# Altium footprint library XMSM0L1105TDGS28R.PcbLib: 3 footprints
Each footprint in its own frame and in the unit in brackets; x right, y up, seen from the top. Pads: shape width x height; smd on the part's side, far side on the other; paste and mask are expansions set on the pad; w line width, h text height; cw(c..) or ccw(c..) is an arc to the next point about the centre after c.
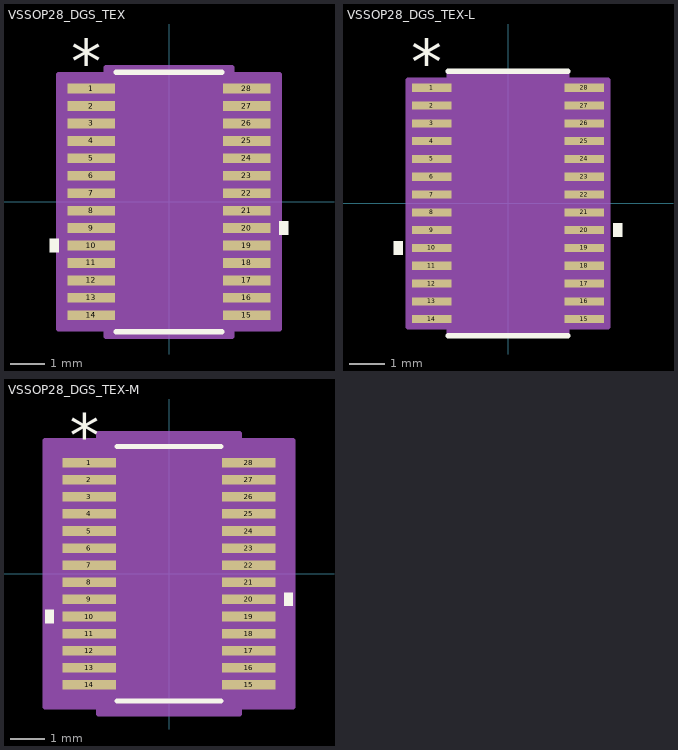
[diagram p0: the footprints below, top view; thin cyan lines are the x and y axes]

## VSSOP28_DGS_TEX [mil]
pads (28):
  rect 53.5x11 smd paste+0 mask+0: 1(-87.75,127.98) 2(-87.75,108.3) 3(-87.75,88.61) 4(-87.75,68.92) 5(-87.75,49.23) 6(-87.75,29.54) 7(-87.75,9.85) 8(-87.75,-9.85) 9(-87.75,-29.54) 10(-87.75,-49.23) 11(-87.75,-68.92) 12(-87.75,-88.61) 13(-87.75,-108.3) 14(-87.75,-127.98) 15(87.75,-127.98) 16(87.75,-108.3) 17(87.75,-88.61) 18(87.75,-68.92) 19(87.75,-49.23) 20(87.75,-29.54) 21(87.75,-9.85) 22(87.75,9.85) 23(87.75,29.54) 24(87.75,49.23) 25(87.75,68.92) 26(87.75,88.61) 27(87.75,108.3) 28(87.75,127.98)
Top Overlay:
  region: -124.5,-41.73 -134.5,-41.73 -134.5,-56.73 -124.5,-56.73
  region: 124.5,-22.04 134.5,-22.04 134.5,-37.03 124.5,-37.03
  lines w6: -59.51,-146.5 59.51,-146.5 ; -59.51,146.5 59.51,146.5
  text "*" at -110.25,133.99 h50
  text ".Designator" at -137.5,-25 h50
Mechanical 13:
  lines w1: -12,141.5 ccw(c0,141.5) 12,141.5 ; -100.5,-133.49 -100.5,-122.48 -61,-122.48 -61,-133.49 -100.5,-133.49 ; -100.5,-113.8 -100.5,-102.8 -61,-102.8 -61,-113.8 -100.5,-113.8 ; -100.5,-94.11 -100.5,-83.11 -61,-83.11 -61,-94.11 -100.5,-94.11 ; -100.5,-74.42 -100.5,-63.41 -61,-63.41 -61,-74.42 -100.5,-74.42 ; -100.5,-54.73 -100.5,-43.73 -61,-43.73 -61,-54.73 -100.5,-54.73 ; -100.5,-35.03 -100.5,-24.04 -61,-24.04 -61,-35.03 -100.5,-35.03 ; -100.5,-15.35 -100.5,-4.34 -61,-4.34 -61,-15.35 -100.5,-15.35 ; -100.5,4.34 -100.5,15.35 -61,15.35 -61,4.34 -100.5,4.34 ; -100.5,24.04 -100.5,35.03 -61,35.03 -61,24.04 -100.5,24.04 ; -100.5,43.73 -100.5,54.73 -61,54.73 -61,43.73 -100.5,43.73 ; -100.5,63.41 -100.5,74.42 -61,74.42 -61,63.41 -100.5,63.41 ; -100.5,83.11 -100.5,94.11 -61,94.11 -61,83.11 -100.5,83.11 ; -100.5,102.8 -100.5,113.8 -61,113.8 -61,102.8 -100.5,102.8 ; -100.5,122.48 -100.5,133.49 -61,133.49 -61,122.48 -100.5,122.48 ; -61,-141.5 61,-141.5 61,141.5 -61,141.5 -61,-141.5 ; 61,-133.49 61,-122.48 100.5,-122.48 100.5,-133.49 61,-133.49 ; 61,-113.8 61,-102.8 100.5,-102.8 100.5,-113.8 61,-113.8 ; 61,-94.11 61,-83.11 100.5,-83.11 100.5,-94.11 61,-94.11 ; 61,-74.42 61,-63.41 100.5,-63.41 100.5,-74.42 61,-74.42 ; 61,-54.73 61,-43.73 100.5,-43.73 100.5,-54.73 61,-54.73 ; 61,-35.03 61,-24.04 100.5,-24.04 100.5,-35.03 61,-35.03 ; 61,-15.35 61,-4.34 100.5,-4.34 100.5,-15.35 61,-15.35 ; 61,4.34 61,15.35 100.5,15.35 100.5,4.34 61,4.34 ; 61,24.04 61,35.03 100.5,35.03 100.5,24.04 61,24.04 ; 61,43.73 61,54.73 100.5,54.73 100.5,43.73 61,43.73 ; 61,63.41 61,74.42 100.5,74.42 100.5,63.41 61,63.41 ; 61,83.11 61,94.11 100.5,94.11 100.5,83.11 61,83.11 ; 61,102.8 61,113.8 100.5,113.8 100.5,102.8 61,102.8 ; 61,122.48 61,133.49 100.5,133.49 100.5,122.48 61,122.48
  text ".Designator" at -137.5,-25 h50
  text "*" at -58.5,88.5 h50
Mechanical 15:
  region: -71,-143.49 -124.5,-143.49 -124.5,143.49 -71,143.49 -71,151.5 71,151.5 71,143.49 124.5,143.49 124.5,-143.49 71,-143.49 71,-151.5 -71,-151.5
  lines w6: -124.5,-143.49 -124.5,143.49 -71,143.49 -71,151.5 71,151.5 71,143.49 124.5,143.49 124.5,-143.49 71,-143.49 71,-151.5 -71,-151.5 -71,-143.49 -124.5,-143.49
3D body "VSSOP28_DGS_TEX.step": height 43.11, standoff 0, extent -100.51,-141.5 100.51,141.5

## VSSOP28_DGS_TEX-L [mil]
pads (28):
  rect 44x9 smd paste+0 mask+0: 1(-84.5,127.98) 2(-84.5,108.3) 3(-84.5,88.61) 4(-84.5,68.92) 5(-84.5,49.23) 6(-84.5,29.54) 7(-84.5,9.85) 8(-84.5,-9.85) 9(-84.5,-29.54) 10(-84.5,-49.23) 11(-84.5,-68.92) 12(-84.5,-88.61) 13(-84.5,-108.3) 14(-84.5,-127.98) 15(84.5,-127.98) 16(84.5,-108.3) 17(84.5,-88.61) 18(84.5,-68.92) 19(84.5,-49.23) 20(84.5,-29.54) 21(84.5,-9.85) 22(84.5,9.85) 23(84.5,29.54) 24(84.5,49.23) 25(84.5,68.92) 26(84.5,88.61) 27(84.5,108.3) 28(84.5,127.98)
Top Overlay:
  region: -116.5,-41.73 -126.5,-41.73 -126.5,-56.73 -116.5,-56.73
  region: 116.5,-22.04 126.5,-22.04 126.5,-37.03 116.5,-37.03
  lines w6: -66,-146.5 66,-146.5 ; -66,146.5 66,146.5
  text "*" at -107,131.99 h50
  text ".Designator" at -137.5,-25 h50
Mechanical 13:
  lines w1: -12,141.5 ccw(c0,141.5) 12,141.5 ; -100.5,-133.49 -100.5,-122.48 -61,-122.48 -61,-133.49 -100.5,-133.49 ; -100.5,-113.8 -100.5,-102.8 -61,-102.8 -61,-113.8 -100.5,-113.8 ; -100.5,-94.11 -100.5,-83.11 -61,-83.11 -61,-94.11 -100.5,-94.11 ; -100.5,-74.42 -100.5,-63.41 -61,-63.41 -61,-74.42 -100.5,-74.42 ; -100.5,-54.73 -100.5,-43.73 -61,-43.73 -61,-54.73 -100.5,-54.73 ; -100.5,-35.03 -100.5,-24.04 -61,-24.04 -61,-35.03 -100.5,-35.03 ; -100.5,-15.35 -100.5,-4.34 -61,-4.34 -61,-15.35 -100.5,-15.35 ; -100.5,4.34 -100.5,15.35 -61,15.35 -61,4.34 -100.5,4.34 ; -100.5,24.04 -100.5,35.03 -61,35.03 -61,24.04 -100.5,24.04 ; -100.5,43.73 -100.5,54.73 -61,54.73 -61,43.73 -100.5,43.73 ; -100.5,63.41 -100.5,74.42 -61,74.42 -61,63.41 -100.5,63.41 ; -100.5,83.11 -100.5,94.11 -61,94.11 -61,83.11 -100.5,83.11 ; -100.5,102.8 -100.5,113.8 -61,113.8 -61,102.8 -100.5,102.8 ; -100.5,122.48 -100.5,133.49 -61,133.49 -61,122.48 -100.5,122.48 ; -61,-141.5 61,-141.5 61,141.5 -61,141.5 -61,-141.5 ; 61,-133.49 61,-122.48 100.5,-122.48 100.5,-133.49 61,-133.49 ; 61,-113.8 61,-102.8 100.5,-102.8 100.5,-113.8 61,-113.8 ; 61,-94.11 61,-83.11 100.5,-83.11 100.5,-94.11 61,-94.11 ; 61,-74.42 61,-63.41 100.5,-63.41 100.5,-74.42 61,-74.42 ; 61,-54.73 61,-43.73 100.5,-43.73 100.5,-54.73 61,-54.73 ; 61,-35.03 61,-24.04 100.5,-24.04 100.5,-35.03 61,-35.03 ; 61,-15.35 61,-4.34 100.5,-4.34 100.5,-15.35 61,-15.35 ; 61,4.34 61,15.35 100.5,15.35 100.5,4.34 61,4.34 ; 61,24.04 61,35.03 100.5,35.03 100.5,24.04 61,24.04 ; 61,43.73 61,54.73 100.5,54.73 100.5,43.73 61,43.73 ; 61,63.41 61,74.42 100.5,74.42 100.5,63.41 61,63.41 ; 61,83.11 61,94.11 100.5,94.11 100.5,83.11 61,83.11 ; 61,102.8 61,113.8 100.5,113.8 100.5,102.8 61,102.8 ; 61,122.48 61,133.49 100.5,133.49 100.5,122.48 61,122.48
  text ".Designator" at -137.5,-25 h50
  text "*" at -58.5,88.5 h50
Mechanical 15:
  region: -65,-136.49 -110.5,-136.49 -110.5,136.49 -65,136.49 -65,145.5 65,145.5 65,136.49 110.5,136.49 110.5,-136.49 65,-136.49 65,-145.5 -65,-145.5
  lines w6: -110.5,-136.49 -110.5,136.49 -65,136.49 -65,145.5 65,145.5 65,136.49 110.5,136.49 110.5,-136.49 65,-136.49 65,-145.5 -65,-145.5 -65,-136.49 -110.5,-136.49
3D body "VSSOP28_DGS_TEX.step": height 43.11, standoff 0, extent -100.51,-141.5 100.51,141.5

## VSSOP28_DGS_TEX-M [mil]
pads (28):
  rect 61.5x11 smd paste+0 mask+0: 1(-91.75,127.98) 2(-91.75,108.3) 3(-91.75,88.61) 4(-91.75,68.92) 5(-91.75,49.23) 6(-91.75,29.54) 7(-91.75,9.85) 8(-91.75,-9.85) 9(-91.75,-29.54) 10(-91.75,-49.23) 11(-91.75,-68.92) 12(-91.75,-88.61) 13(-91.75,-108.3) 14(-91.75,-127.98) 15(91.75,-127.98) 16(91.75,-108.3) 17(91.75,-88.61) 18(91.75,-68.92) 19(91.75,-49.23) 20(91.75,-29.54) 21(91.75,-9.85) 22(91.75,9.85) 23(91.75,29.54) 24(91.75,49.23) 25(91.75,68.92) 26(91.75,88.61) 27(91.75,108.3) 28(91.75,127.98)
Top Overlay:
  region: -132.5,-41.73 -142.5,-41.73 -142.5,-56.73 -132.5,-56.73
  region: 132.5,-22.04 142.5,-22.04 142.5,-37.03 132.5,-37.03
  lines w6: -59.51,-146.5 59.51,-146.5 ; -59.51,146.5 59.51,146.5
  text "*" at -114.25,133.99 h50
  text ".Designator" at -137.5,-25 h50
Mechanical 13:
  lines w1: -12,141.5 ccw(c0,141.5) 12,141.5 ; -100.5,-133.49 -100.5,-122.48 -61,-122.48 -61,-133.49 -100.5,-133.49 ; -100.5,-113.8 -100.5,-102.8 -61,-102.8 -61,-113.8 -100.5,-113.8 ; -100.5,-94.11 -100.5,-83.11 -61,-83.11 -61,-94.11 -100.5,-94.11 ; -100.5,-74.42 -100.5,-63.41 -61,-63.41 -61,-74.42 -100.5,-74.42 ; -100.5,-54.73 -100.5,-43.73 -61,-43.73 -61,-54.73 -100.5,-54.73 ; -100.5,-35.03 -100.5,-24.04 -61,-24.04 -61,-35.03 -100.5,-35.03 ; -100.5,-15.35 -100.5,-4.34 -61,-4.34 -61,-15.35 -100.5,-15.35 ; -100.5,4.34 -100.5,15.35 -61,15.35 -61,4.34 -100.5,4.34 ; -100.5,24.04 -100.5,35.03 -61,35.03 -61,24.04 -100.5,24.04 ; -100.5,43.73 -100.5,54.73 -61,54.73 -61,43.73 -100.5,43.73 ; -100.5,63.41 -100.5,74.42 -61,74.42 -61,63.41 -100.5,63.41 ; -100.5,83.11 -100.5,94.11 -61,94.11 -61,83.11 -100.5,83.11 ; -100.5,102.8 -100.5,113.8 -61,113.8 -61,102.8 -100.5,102.8 ; -100.5,122.48 -100.5,133.49 -61,133.49 -61,122.48 -100.5,122.48 ; -61,-141.5 61,-141.5 61,141.5 -61,141.5 -61,-141.5 ; 61,-133.49 61,-122.48 100.5,-122.48 100.5,-133.49 61,-133.49 ; 61,-113.8 61,-102.8 100.5,-102.8 100.5,-113.8 61,-113.8 ; 61,-94.11 61,-83.11 100.5,-83.11 100.5,-94.11 61,-94.11 ; 61,-74.42 61,-63.41 100.5,-63.41 100.5,-74.42 61,-74.42 ; 61,-54.73 61,-43.73 100.5,-43.73 100.5,-54.73 61,-54.73 ; 61,-35.03 61,-24.04 100.5,-24.04 100.5,-35.03 61,-35.03 ; 61,-15.35 61,-4.34 100.5,-4.34 100.5,-15.35 61,-15.35 ; 61,4.34 61,15.35 100.5,15.35 100.5,4.34 61,4.34 ; 61,24.04 61,35.03 100.5,35.03 100.5,24.04 61,24.04 ; 61,43.73 61,54.73 100.5,54.73 100.5,43.73 61,43.73 ; 61,63.41 61,74.42 100.5,74.42 100.5,63.41 61,63.41 ; 61,83.11 61,94.11 100.5,94.11 100.5,83.11 61,83.11 ; 61,102.8 61,113.8 100.5,113.8 100.5,102.8 61,102.8 ; 61,122.48 61,133.49 100.5,133.49 100.5,122.48 61,122.48
  text ".Designator" at -137.5,-25 h50
  text "*" at -58.5,88.5 h50
Mechanical 15:
  region: -81,-153.49 -142.5,-153.49 -142.5,153.49 -81,153.49 -81,161.5 81,161.5 81,153.49 142.5,153.49 142.5,-153.49 81,-153.49 81,-161.5 -81,-161.5
  lines w6: -142.5,-153.49 -142.5,153.49 -81,153.49 -81,161.5 81,161.5 81,153.49 142.5,153.49 142.5,-153.49 81,-153.49 81,-161.5 -81,-161.5 -81,-153.49 -142.5,-153.49
3D body "VSSOP28_DGS_TEX.step": height 43.11, standoff 0, extent -100.51,-141.5 100.51,141.5